# Altium footprint library FootPrintLib_12.PcbLib: 319 footprints (part 14 of 20)
Each footprint in its own frame and in the unit in brackets; x right, y up, seen from the top. Pads: shape width x height; smd on the part's side, far side on the other; paste and mask are expansions set on the pad; w line width, h text height; cw(c..) or ccw(c..) is an arc to the next point about the centre after c.
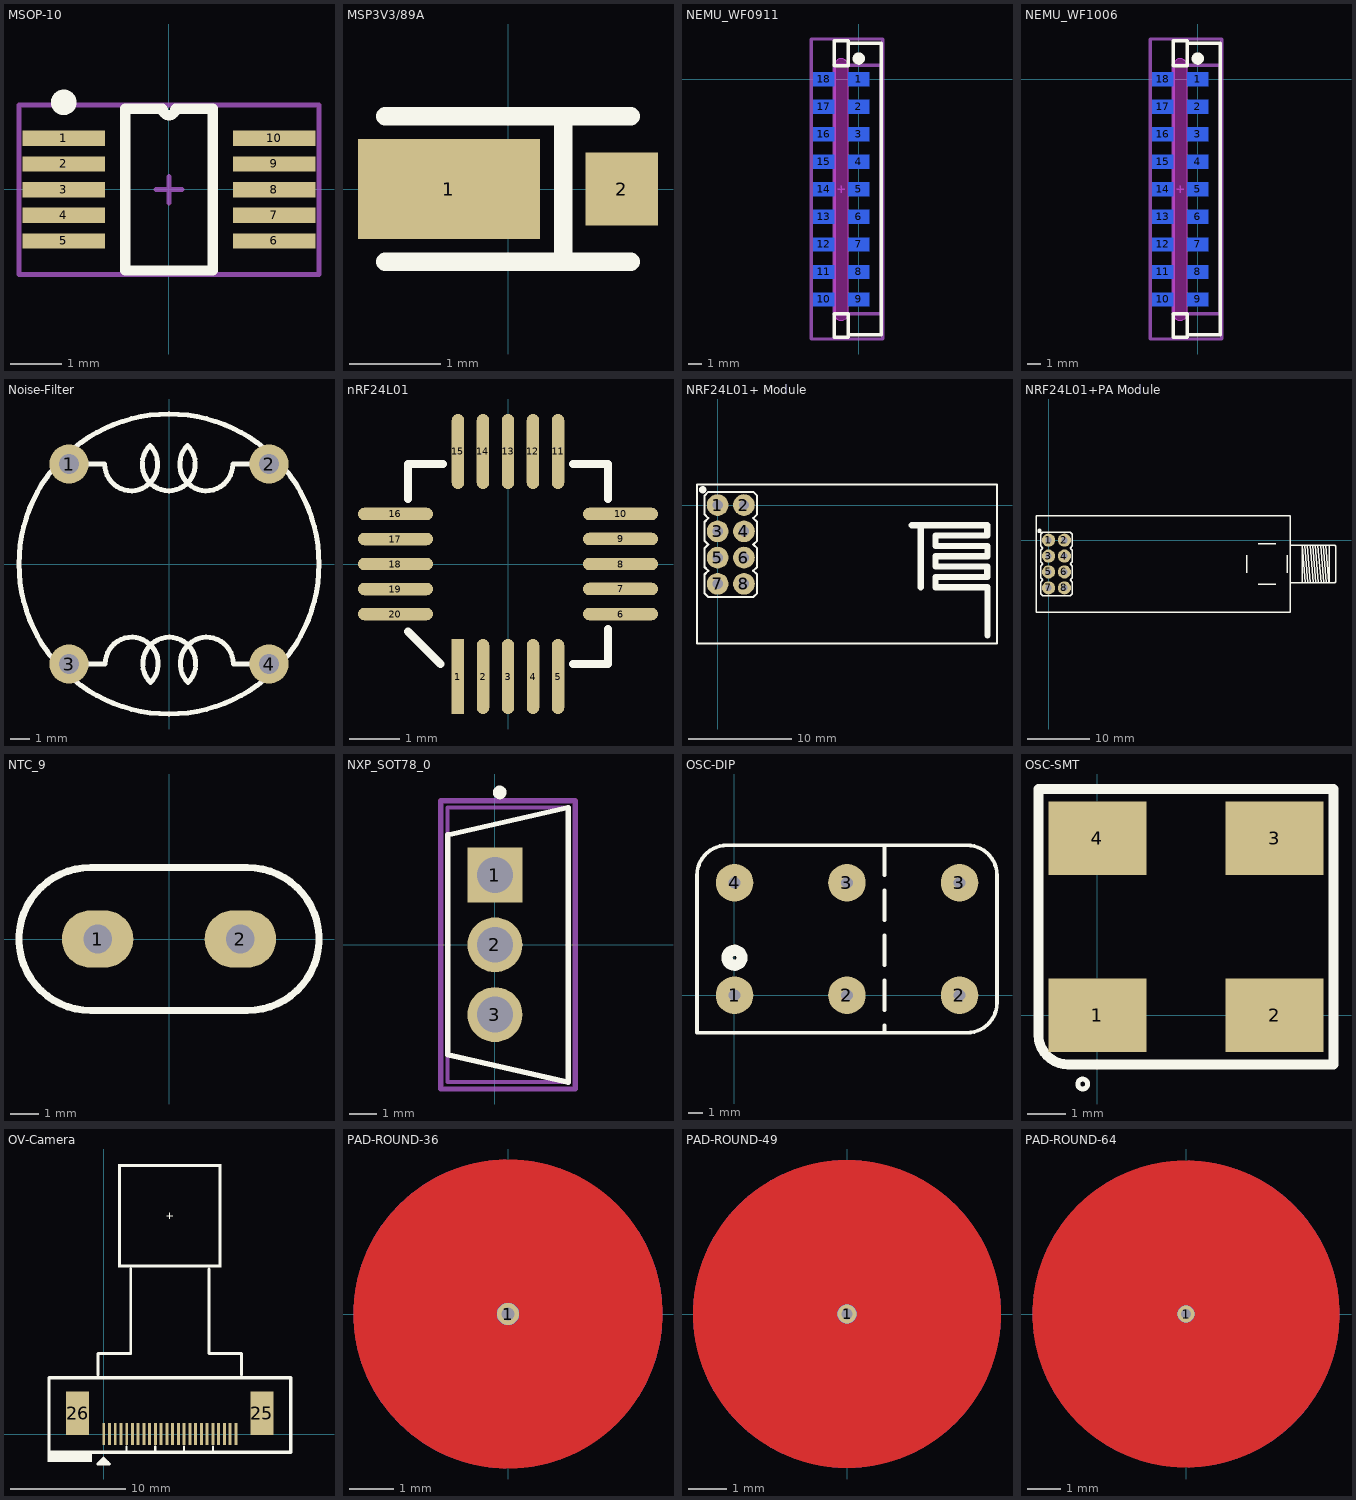
[diagram p13: the footprints below, top view; thin cyan lines are the x and y axes]

## MSOP-10 [mm] "Shrink Small Outline; 10 Leads; Body Width 3 mm; Pitch 0.5 mm"
height 1.1
pads (10):
  rect 1.6x0.3 smd: 1(-2.047,0.997) 2(-2.047,0.497) 3(-2.047,-0.003) 4(-2.047,-0.503) 5(-2.047,-1.003) 6(2.053,-1.003) 7(2.053,-0.503) 8(2.053,-0.003) 9(2.053,0.497) 10(2.053,0.997)
Top Overlay:
  circle w0.25: c-2.047,1.697 r0.125
  lines w0.2: -0.847,-1.578 0.853,-1.578 0.853,1.572 0.128,1.572 cw(c0.003,1.572) -0.122,1.572 -0.847,1.572 -0.847,-1.578
Mechanical 15:
  lines w0.1: -0.251,-0.003 0.257,-0.003 ; 0.003,-0.257 0.003,0.251 ; -2.918,-1.654 2.924,-1.654 2.924,1.648 -2.918,1.648 -2.918,-1.654
3D body "User Library-MSOP10-1.step": height 1.09, standoff 0, extent -2.572,-1.603 2.578,1.597

## MSP3V3/89A [mm] "MicroSMP"
height 0.73
pads (2):
  rect 2x1.1 smd: 1(-0.65,0)
  rect 0.8x0.8 smd: 2(1.25,0)
Top Overlay:
  lines w0.203: -1.35,-0.8 1.35,-0.8 ; -1.35,0.8 1.35,0.8 ; 0.61,-0.8 0.61,0.8

## NEMU_WF0911 [mm] "NEMU Wi-Fi Module by Vowstar"
height 3.2
pads (18):
  rect 1.545x1 smd far side: 1(0,0) 2(0,-2) 3(0,-4) 4(0,-6) 5(0,-8) 6(0,-10) 7(0,-12) 8(0,-14) 9(0,-16) 10(-2.546,-16) 11(-2.546,-14) 12(-2.546,-12) 13(-2.546,-10) 14(-2.546,-8) 15(-2.546,-6) 16(-2.546,-4) 17(-2.546,-2) 18(-2.546,0)
Top Overlay:
  circle w0.5: c0,1.5 r0.2
  lines w0.254: -0.773,-18.55 1.627,-18.55 1.627,2.6 -0.773,2.6 ; -0.773,0.986 -1.773,0.986 -1.773,2.8 -0.773,2.8 -0.773,1.073 ; -1.773,-18.75 -1.773,-17.023 -0.773,-17.023 -0.773,-18.75 -1.773,-18.75
Keep-Out Layer:
  board cut-out: -1.084,1.443 -0.924,1.335 -0.816,1.175 -0.779,0.986 -0.776,0.986 -0.775,0.985 -0.775,-17.022 -0.776,-17.023 -0.779,-17.023 -0.816,-17.212 -0.924,-17.372 -1.084,-17.48 -1.273,-17.517 -1.462,-17.48 -1.622,-17.372 -1.73,-17.212 -1.767,-17.023 -1.77,-17.023 -1.77,0.986 -1.767,0.986 -1.73,1.175 -1.622,1.335 -1.462,1.443 -1.273,1.48
Keep-Out Layer:
  lines w0.025: -0.773,-17.023 cw(c-1.273,-17.023) -1.773,-17.023 -1.773,0.986 cw(c-1.273,0.986) -0.773,0.986 ; -0.773,-17.023 -0.773,0.986
Mechanical 1:
  lines w0.025: -0.773,-17.023 cw(c-1.273,-17.023) -1.773,-17.023 -1.773,0.986 cw(c-1.273,0.986) -0.773,0.986 ; -0.773,-17.023 -0.773,0.986
Mechanical 13:
  lines w0.254: -1.778,-17.043 1.651,-17.043 1.651,1.016 -1.778,1.016 -1.778,-17.043
Mechanical 15:
  lines w0.1: -1.527,-8 -1.019,-8 ; -1.273,-8.254 -1.273,-7.746
  lines w0.254: -3.454,-18.872 -3.454,2.921 1.753,2.921 1.753,-18.872 -3.454,-18.872
3D body "NEMU_WF0911.STEP": height 14.75, standoff -3, extent -1.735,-18.746 1.473,2.805

## NEMU_WF1006 [mm] "NEMU Wi-Fi Module by Vowstar"
height 3.2
pads (18):
  rect 1.545x1 smd far side: 1(0,0) 2(0,-2) 3(0,-4) 4(0,-6) 5(0,-8) 6(0,-10) 7(0,-12) 8(0,-14) 9(0,-16) 10(-2.546,-16) 11(-2.546,-14) 12(-2.546,-12) 13(-2.546,-10) 14(-2.546,-8) 15(-2.546,-6) 16(-2.546,-4) 17(-2.546,-2) 18(-2.546,0)
Top Overlay:
  circle w0.5: c0,1.5 r0.2
  lines w0.254: -0.773,-18.55 1.627,-18.55 1.627,2.6 -0.773,2.6 ; -0.773,0.986 -1.773,0.986 -1.773,2.8 -0.773,2.8 -0.773,1.073 ; -1.773,-18.75 -0.773,-18.75 -0.773,-17.023 -1.773,-17.023 -1.773,-18.75
Keep-Out Layer:
  board cut-out: -1.084,1.443 -0.924,1.335 -0.816,1.175 -0.779,0.986 -0.776,0.986 -0.775,0.985 -0.775,-17.022 -0.776,-17.023 -0.779,-17.023 -0.816,-17.212 -0.924,-17.372 -1.084,-17.48 -1.273,-17.517 -1.462,-17.48 -1.622,-17.372 -1.73,-17.212 -1.767,-17.023 -1.77,-17.023 -1.77,0.986 -1.767,0.986 -1.73,1.175 -1.622,1.335 -1.462,1.443 -1.273,1.48
Keep-Out Layer:
  lines w0.025: -0.773,-17.023 cw(c-1.273,-17.023) -1.773,-17.023 -1.773,0.986 cw(c-1.273,0.986) -0.773,0.986 ; -0.773,-17.023 -0.773,0.986
Mechanical 1:
  lines w0.025: -0.773,-17.023 cw(c-1.273,-17.023) -1.773,-17.023 -1.773,0.986 cw(c-1.273,0.986) -0.773,0.986 ; -0.773,-17.023 -0.773,0.986
Mechanical 13:
  lines w0.254: -1.778,-17.043 -1.778,1.016 1.651,1.016 1.651,-17.043 -1.778,-17.043
Mechanical 15:
  lines w0.1: -1.527,-8 -1.019,-8 ; -1.273,-8.254 -1.273,-7.746
  lines w0.254: -3.454,-18.872 1.753,-18.872 1.753,2.921 -3.454,2.921 -3.454,-18.872
3D body "NEMU_WF1006.step": height 14.75, standoff -3, extent -1.735,-18.745 1.473,2.805

## Noise-Filter [mm]
pads (4):
  round 2 hole 1: 1(-5.08,5.08) 2(5.08,5.08) 3(-5.08,-5.08) 4(5.08,-5.08)
Top Overlay:
  circle w0.254: c0,0 r7.62
  lines w0.254: -5.08,-5.08 -3.302,-5.08 ; -5.08,5.08 -3.302,5.08 ; -3.265,5.078 ccw(c-1.918,5.067) -0.965,6.02 ccw(c-0.013,5.067) 0.94,6.02 ccw(c1.892,5.067) 3.239,5.079 ; -3.239,-5.079 cw(c-1.892,-5.067) -0.94,-6.02 cw(c0.013,-5.067) 0.965,-6.02 cw(c1.918,-5.067) 3.265,-5.078 ; 3.302,-5.08 5.08,-5.08 ; 3.302,5.08 5.08,5.08

## nRF24L01 [mm]
pads (20):
  rect 0.25x1.5 smd: 1(-1,-2.25)
  oval 0.25x1.5 smd: 2(-0.5,-2.25) 3(0,-2.25) 4(0.5,-2.25) 5(1,-2.25) 11(1,2.25) 12(0.5,2.25) 13(0,2.25) 14(-0.5,2.25) 15(-1,2.25)
  oval 1.5x0.25 smd: 6(2.25,-1) 7(2.25,-0.5) 8(2.25,0) 9(2.25,0.5) 10(2.25,1) 16(-2.25,1) 17(-2.25,0.5) 18(-2.25,0) 19(-2.25,-0.5) 20(-2.25,-1)
Top Overlay:
  lines w0.152: -2,-1.35 -1.35,-2 ; -2,1.3 -2,2 -1.3,2 ; 1.3,-2 2,-2 2,-1.3 ; 1.3,2 2,2 2,1.3

## NRF24L01+ Module [mm] "NRF24L01+, 8-Leads, Pitch 2.54mm, 29 x 15.4 mm"
height 5.5
pads (8):
  round 2.1 hole 1: 1(0,0) 2(2.54,0) 3(0,-2.54) 4(2.54,-2.54) 5(0,-5.08) 6(2.54,-5.08) 7(0,-7.62) 8(2.54,-7.62)
Top Overlay:
  circle w0.4: c-1.45,1.475 r0.15
  lines w0.2: -0.91,-6.35 -1.27,-5.99 -1.27,-4.18 -0.9,-3.81 ; -0.91,-3.81 -1.27,-3.45 -1.27,-1.64 -0.9,-1.27 -1.27,-0.9 -1.27,0.91 -0.91,1.27 3.45,1.27 3.81,0.91 3.81,-0.9 3.44,-1.27 3.81,-1.64 3.81,-3.45 3.45,-3.81 ; -0.9,-6.35 -1.27,-6.72 -1.27,-8.53 -0.91,-8.89 3.45,-8.89 3.81,-8.53 3.81,-6.72 3.44,-6.35 ; 3.44,-3.81 3.81,-4.18 3.81,-5.99 3.45,-6.35 ; -2,-13.4 27,-13.4 27,2 -2,2 -2,-13.4
  lines w0.6: 18.75,-1.95 26.05,-1.95 26.05,-2.95 21.05,-2.95 21.05,-3.95 26.075,-3.95 26.075,-4.95 21.05,-4.95 21.05,-5.95 26.05,-5.95 26.05,-6.95 21.05,-6.95 21.05,-7.95 26.075,-7.95 26.075,-12.6 ; 19.625,-7.95 19.625,-1.95
3D body "NRF24L01_V3.step": height 7.3, standoff -5.9, extent -2,-13.4 27,2

## NRF24L01+PA Module [mm] "NRF24L01+PA, 8-Leads, Pitch 2.54mm, 40.6 x 15.4 mm"
height 8.2
pads (8):
  round 2.1 hole 1: 1(0,0) 2(2.54,0) 3(0,-2.54) 4(2.54,-2.54) 5(0,-5.08) 6(2.54,-5.08) 7(0,-7.62) 8(2.54,-7.62)
Top Overlay:
  circle w0.4: c-1.45,1.475 r0.15
  lines w0.2: -0.91,-6.35 -1.27,-5.99 -1.27,-4.18 -0.9,-3.81 ; -0.91,-3.81 -1.27,-3.45 -1.27,-1.64 -0.9,-1.27 -1.27,-0.9 -1.27,0.91 -0.91,1.27 3.45,1.27 3.81,0.91 3.81,-0.9 3.44,-1.27 3.81,-1.64 3.81,-3.45 3.45,-3.81 ; -0.9,-6.35 -1.27,-6.72 -1.27,-8.53 -0.91,-8.89 3.45,-8.89 3.81,-8.53 3.81,-6.72 3.44,-6.35 ; 3.44,-3.81 3.81,-4.18 3.81,-5.99 3.45,-6.35 ; 31.645,-5.21 31.645,-2.41 ; 33.495,-7.06 36.295,-7.06 ; 33.495,-0.56 36.295,-0.56 ; 38.145,-5.21 38.145,-2.41 ; 38.67,-6.81 45.52,-6.81 ccw(c45.52,-6.435) 45.895,-6.435 45.895,-1.185 ccw(c45.52,-1.185) 45.52,-0.81 38.67,-0.81 ; 40.47,-6.785 40.47,-0.81 40.97,-6.81 ; 40.895,-0.81 41.395,-6.81 ; 41.32,-0.81 41.82,-6.81 ; 41.745,-0.81 42.245,-6.81 ; 42.17,-0.81 42.67,-6.81 ; 42.595,-0.81 43.095,-6.81 ; 43.02,-0.81 43.52,-6.81 ; 43.445,-0.81 43.945,-6.81 ; 43.87,-0.81 44.37,-6.81 ; 44.27,-0.81 44.77,-6.81 ccw(c44.77,-6.785) 44.795,-6.785 44.795,-0.81 ; -2,-11.51 -2,3.89 38.6,3.89 38.6,-11.51 -2,-11.51
3D body "NRF24L01PA_V2.step": height 13.6, standoff -5.9, extent -2,-11.51 45.895,3.89

## NTC_9 [mm]
height 18
pads (2):
  oval 2.5x2 hole 1: 1(-2.5,0) 2(2.5,0)
Top Overlay:
  lines w0.254: -2.75,-2.5 cw(c-2.75,0) -2.75,2.5 2.75,2.5 cw(c2.75,0) 2.75,-2.5 -2.75,-2.5

## NXP_SOT78_0 [mm]
pads (3):
  rect 2x2 hole 1.3 paste-2539.97 mask+0: 1(0,2.54)
  round 2 hole 1.3 paste-2539.97 mask+0: 2(0,0) 3(0,-2.54)
Top Overlay:
  circle w0.25: c0.175,5.55 r0.125
  lines w0.2: 2.675,-5 -1.725,-4 -1.725,4 2.675,5 ; 2.675,-4.95 2.675,4.95
Mechanical 10:
  lines w0.2: -1.975,-5.25 -1.975,5.25 2.925,5.25 2.925,-5.25 -1.975,-5.25
Mechanical 12:
  lines w0.15: -1.725,-5 -1.725,5 2.675,5 2.675,-5 -1.725,-5
Mechanical 15:
  lines w0.1: -0.025,0 0.975,0 ; 0.475,-0.5 0.475,0.5
  lines w0.2: -1.975,-5.25 -1.975,5.25 2.925,5.25 2.925,-5.25 -1.975,-5.25

## OSC-DIP [mm]
pads (6):
  round 2.54 hole 0.8: 1(0.011,0.004) 2(7.631,0.004) 2(15.251,0.004) 3(7.631,7.624) 3(15.251,7.624) 4(0.011,7.624)
Top Overlay:
  circle w0.75: c0.011,2.544 r0.508
  lines w0.254: 10.171,-2.536 10.171,-2.028 ; 10.171,-1.012 10.171,1.02 ; 10.171,2.036 10.171,4.068 ; 10.171,5.084 10.171,7.116 ; 10.171,8.132 10.171,10.164 ; -2.529,-2.536 -2.529,8.132 cw(c-0.497,8.132) -0.497,10.164 15.759,10.164 cw(c15.759,8.132) 17.791,8.132 17.791,-0.504 cw(c15.759,-0.504) 15.759,-2.536 -2.529,-2.536

## OSC-SMT [mil]
pads (4):
  rect 100x75 smd: 1(0,0) 2(180,0) 3(180,180) 4(0,180)
Top Overlay:
  circle w5: c-15,-70 r5
  lines w10: -60,-20 ccw(c-30,-20) -30,-50 240,-50 240,230 -60,230 -60,-20

## OV-Camera [mm] "OV9650/OV2460/OV3640/OV5640"
height 5.3
pads (26):
  rect 0.254x1.9 smd: 1(0,0) 2(0.5,0) 3(1,0) 4(1.5,0) 5(2,0) 6(2.5,0) 7(3,0) 8(3.5,0) 9(4,0) 10(4.5,0) 11(5,0) 12(5.5,0) 13(6,0) 14(6.5,0) 15(7,0) 16(7.5,0) 17(8,0) 18(8.5,0) 19(9,0) 20(9.5,0) 21(10,0) 22(10.5,0) 23(11,0) 24(11.5,0)
  rect 2x3.81 smd: 25(13.77,1.8) 26(-2.27,1.8)
Top Overlay:
  region: 1.25,23.5 1.25,14.5 1.504,14.5 1.504,23.5
  region: 9.996,23.5 9.996,14.5 10.25,14.5 10.25,23.5
  rectangle: -4.916,-2.42 -1.032,-1.57
  rectangle: 1.25,23.246 10.25,23.5
  rectangle: 1.25,14.5 10.25,14.754
  lines w0.02: 5.496,19 6.004,19 ; 5.75,18.746 5.75,19.254
  lines w0.2: 1.984,-1.469 1.984,-1.112 ; 4.473,-1.469 4.473,-1.112 ; 6.988,-1.469 6.988,-1.112 ; 9.503,-1.469 9.503,-1.112
  lines w0.254: -0.503,5.156 -0.503,6.985 ; -0.5,7 2.337,7 ; -0.317,-2.404 0.286,-2.404 0.345,-2.463 ; -0.016,-2.611 -0.016,-2.103 ; 2.35,7.01 2.35,14.351 ; 9.15,14.351 9.15,7.004 9.154,7 12,7 ; 11.994,5.156 11.994,6.985 ; -0.016,-2.103 -0.524,-2.611 0.492,-2.611 -0.016,-2.103
  lines w0.3: 16.266,-1.596 -4.766,-1.596 -4.766,4.882 16.277,4.882 16.277,-1.596
3D body "User Library-FPC0.5-SMT-24P-T.step": height 1.24, standoff -0.03, extent -3.151,0.473 14.549,4.73
3D body "User Library-OV9655.STEP": height 5.75, standoff -0.28, extent -0.535,1.905 11.965,23.405

## PAD-ROUND-36 [mm] "PAD-ROUND-36,R=3.385mm"
pads (1):
  round 0.5 smd far side: 1(0,0)
via 0,0 diameter 0.5 hole 0.3
Top Layer:
  circle w6.77: c0,0 r0.1
Mechanical 13:
  circle w0.203: c0,0 r3.385

## PAD-ROUND-49 [mm] "PAD-ROUND-49,R=3.949mm"
pads (1):
  round 0.5 smd far side: 1(0,0)
via 0,0 diameter 0.5 hole 0.3
Top Layer:
  circle w7.899: c0,0 r0.1
Mechanical 13:
  circle w0.203: c0,0 r3.949

## PAD-ROUND-64 [mm] "PAD-ROUND-64,R=4.514mm"
pads (1):
  round 0.5 smd far side: 1(0,0)
via 0,0 diameter 0.5 hole 0.3
Top Layer:
  circle w9.027: c0,0 r0.1
Mechanical 13:
  circle w0.203: c0,0 r4.514